# Altium schematic symbol library STPST10H100SBYTR.SchLib: 1 symbol
Pins are listed as number, name and electrical type; pins without a type are passive.

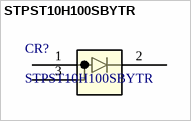
[diagram p0: symbol STPST10H100SBYTR]

## STPST10H100SBYTR
designator CR?
Automotive 100 V, 10 A, DPAK Power Schottky Trench Rectifier; Manufacturer_Name: STMicroelectronics; Copyright: Copyright (C) 2026 Ultra Librarian. All rights reserved.; Manufacturer_Part_Number: STPST10H100SBYTR; Datasheet: https://www.st.com/resource/en/datasheet/stpst10h100sb-y.pdf; RefDes: RefDes; Type: Type
footprint DPAK_STM
pins: 1 ANODE, 2 CATHODE, 3 ANODE